# Altium schematic symbol library Comparator.SchLib: 1 symbol
Pins are listed as number, name and electrical type; pins without a type are passive.

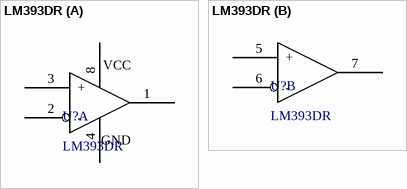
[diagram p0: symbol LM393DR]

## LM393DR
designator U?
Dual Differential Comparators; Manufacturer: Texas Instruments; Active Read Current - Max: Active; Ib - Input Bias Current: 50 nA; Number of Channels: 2 Channel; Operating Supply Current: 2.5 mA; Supply Voltage - Max: 30 V; Supply Voltage - Min: 2 V; Voltage Gain dB: 100 dB; Vos - Input Offset Voltage: 5 mV; Supplier 1 URL: https://www.mouser.vn/en/ProductDetail/Texas-Instruments/LM393DR?qs=8k%2FZSzWMuCP%2FrtMSX0i7pQ%3D%3D; Supplier 2 URL: https://www.digikey.com/en/products/detail/texas-instruments/LM393DR/276659; Supplier 3 URL: N/A; Value: LM393DR; CMRR - Common Mode Rejection Ratio: N/A; Dual Supply Voltage: N/A; GBP - Gain Bandwidth Product: N/A; Output Current per Channel: N/A; SR - Slew Rate: N/A; Manufacturer Part Number: LM393DR; Supplier 1: Mouser; Supplier 1 Part Number: 595-LM393DR; Supplier 2: Digi-Key; Supplier 2 Part Number: 296-1015-2-ND; Supplier 3: thegioiic; Supplier 3 Part Number: N/A; Mount: SMD/SMT; Operating Temperature Max: + 70 C; Operating Temperature Min: 0 C; Package / Case: SOIC-8; Packaging: Tape and Reel; ComponentLink1Description: Datasheet; ComponentLink1URL: https://www.lcsc.com/datasheet/C67470.pdf?spm=wm.sxq.inf.ggs___wm.fly.bg.2.xh&lcsc_vid=FlkIUABWQVJeAgZfQwdWUlcFT1ZYUV1ST1deUwVWQ1IxVlNfRFRWXlxRTldcVTsOAxUeFF5JWBYZEEoKFBINSQcJGk4eFQsCAgIaSgADAwAHC0slQ1ZbUlZUWQkaCgg%3D; LCSC Part #: C67470
footprint LM393DR_SOIC8 (SOIC, 8-Leads, Body 4.90x3.90mm, Pitch 1.27mm, IPC Medium Density)
part A pins: 1 OUT 1, 2 -, 3 +, 4 GND, 8 VCC
part B pins: 5 +, 6 -, 7 OUT 1